# Altium footprint library Y2_CAP.PcbLib: 1 footprints
Each footprint in its own frame and in the unit in brackets; x right, y up, seen from the top. Pads: shape width x height; smd on the part's side, far side on the other; paste and mask are expansions set on the pad; w line width, h text height; cw(c..) or ccw(c..) is an arc to the next point about the centre after c.
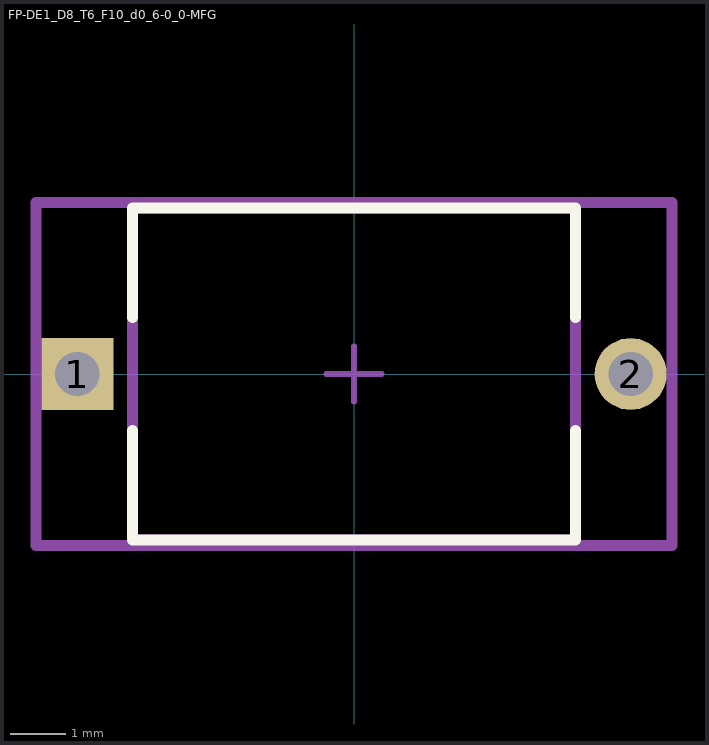
[diagram p0: the footprint, top view; thin cyan lines are the x and y axes]

## FP-DE1_D8_T6_F10_d0_6-0_0-MFG [mm]
pads (2):
  rect 1.3x1.3 hole 0.8 paste-2539.97 mask+0: 1(-5,0)
  round 1.3 hole 0.8 paste-2539.97 mask+0: 2(5,0)
Top Overlay:
  lines w0.2: -4,-1.025 -4,-3 4,-3 4,-1.025 ; -4,1.025 -4,3 4,3 4,1.025
Top Assembly:
  lines w0.2: -5.75,-3.1 -5.75,3.1 5.75,3.1 5.75,-3.1 -5.75,-3.1
  text ".Designator" at 0,0.188 h1
Top 3D Body:
  lines w0.2: -4,-3 -4,3 4,3 4,-3 -4,-3
Top Courtyard:
  lines w0.2: -5.75,-3.1 -5.75,3.1 5.75,3.1 5.75,-3.1 -5.75,-3.1
Top Component Center:
  lines w0.1: -0.5,0 0.5,0 ; 0,-0.5 0,0.5
3D body "Cap_Murata_DE1B3RB471KJ4BR01F_eec.STEP": height 0.25, standoff 0, extent -5.75,-3.1 5.75,3.1